# EAGLE library part IC_PCF8574 (library dp_devices.v6)
PCF8574 I2C remote 8-bit I/O expander
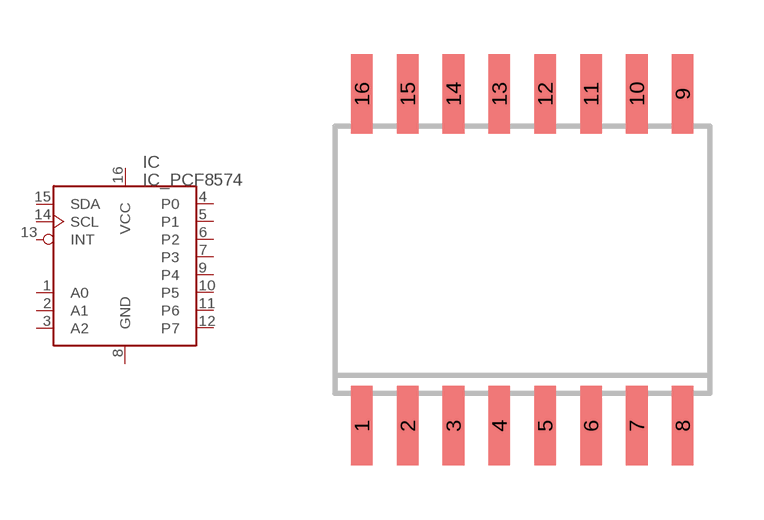
[diagram p188: symbol with the pads of SOIC-16W; footprint SOIC-16W]

Designator prefix IC

## IC_PCF8574  [SOIC-16W]
1  A0  in
2  A1  in
3  A2  in
4  P0
5  P1
6  P2
7  P3
8  GND  sup
9  P4
10  P5
11  P6
12  P7
13  INT  out
14  SCL  in
15  SDA
16  VCC  sup

## Footprint SOIC-16W (pad centres in mm)
smd 0.6 x 2.2: 1 -4.445,-4.6; 2 -3.175,-4.6; 3 -1.905,-4.6; 4 -0.635,-4.6; 5 0.635,-4.6; 6 1.905,-4.6; 7 3.175,-4.6; 8 4.445,-4.6; 9 4.445,4.6; 10 3.175,4.6; 11 1.905,4.6; 12 0.635,4.6; 13 -0.635,4.6; 14 -1.905,4.6; 15 -3.175,4.6; 16 -4.445,4.6